# Altium footprint library Footprint.PcbLib: 411 footprints (part 7 of 26)
Each footprint in its own frame and in the unit in brackets; x right, y up, seen from the top. Pads: shape width x height; smd on the part's side, far side on the other; paste and mask are expansions set on the pad; w line width, h text height; cw(c..) or ccw(c..) is an arc to the next point about the centre after c.
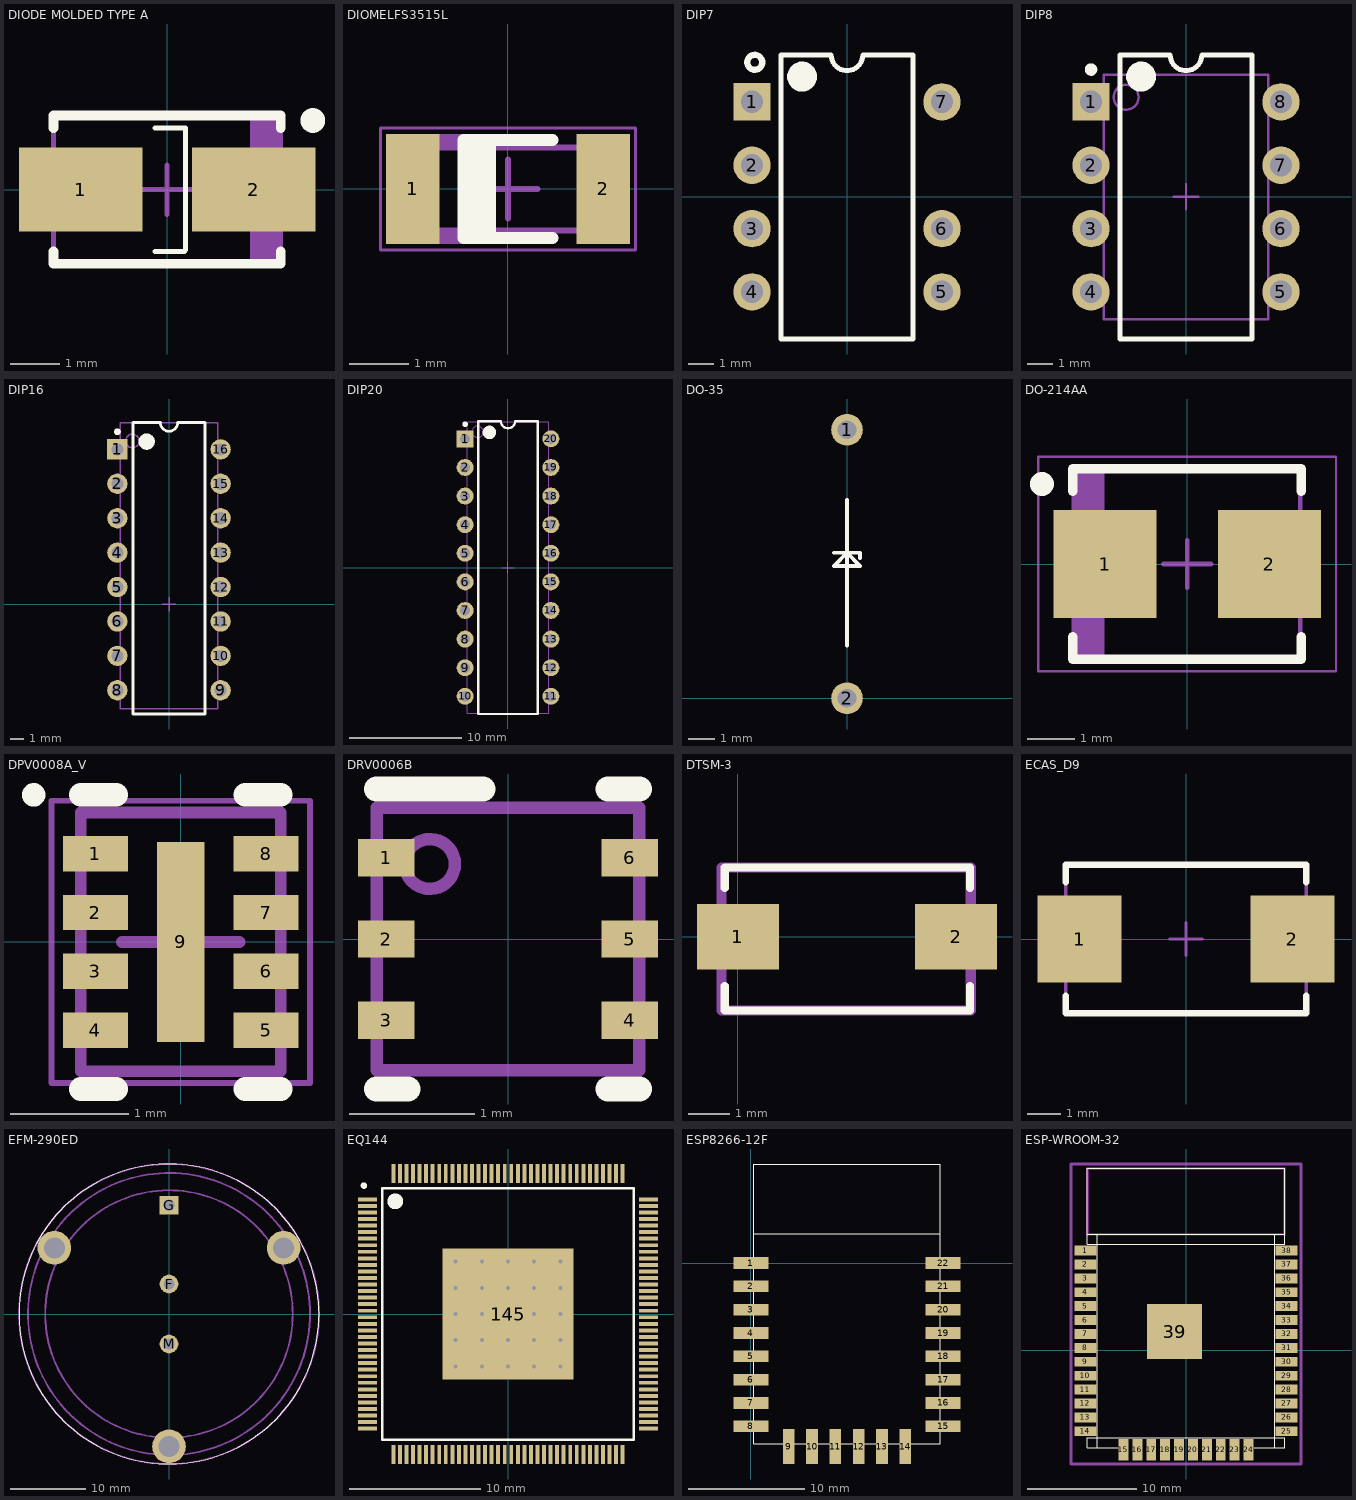
[diagram p6: the footprints below, top view; thin cyan lines are the x and y axes]

## DIODE MOLDED TYPE A [mm] "Molded Diode, 2-Leads, Body 4.30x2.60mm, IPC Medium Density"
height 2.3
pads (2):
  rect 2.5x1.7 smd: 1(-1.75,0) 2(1.75,0)
Top Overlay:
  circle w0.25: c2.95,1.4 r0.125
  lines w0.1: -0.25,-1.25 0.35,-1.25 ; -0.25,1.25 0.375,1.25 0.375,-1.225
  lines w0.2: -2.3,-1.25 -2.3,-1.5 2.3,-1.5 2.3,-1.25 ; -2.3,1.25 -2.3,1.5 2.3,1.5 2.3,1.25
Mechanical 15:
  rectangle: 1.681,-1.46 2.3,1.46
  lines w0.1: -0.5,0 0.5,0 ; 0,-0.5 0,0.5 ; -2.3,-1.46 -2.3,1.46 2.3,1.46 2.3,-1.46 -2.3,-1.46
  text ".Designator" at -2.7,1.9 h1.52
3D body "DIODE MOLDED TYPE A.step": height 2.3, standoff 0, extent -2.52,-1.46 2.52,1.46

## DIOMELFS3515L [mm] "MELF S Diode, 2-Leads, Body 3,50x1,50mm, IPC High Density"
height 1.4
pads (2):
  rect 0.9x1.85 smd: 1(-1.6,0) 2(1.6,0)
Top Overlay:
  rectangle: -0.75,-0.825 -0.2,0.825
  lines w0.2: 0.75,-0.825 -0.75,-0.825 -0.75,0.825 0.75,0.825
Mechanical 13:
  lines w0.1: -1.85,-0.7 1.85,-0.7 1.85,0.7 -1.85,0.7 -1.85,-0.7
Mechanical 15:
  rectangle: -1.75,-0.825 -1.2,0.825
  lines w0.05: -2.15,-1.025 2.15,-1.025 2.15,1.025 -2.15,1.025 -2.15,-1.025
  lines w0.1: -0.5,0 0.5,0 ; 0,-0.5 0,0.5
  lines w0.2: -0.25,-0.825 -1.75,-0.825 -1.75,0.825 -0.25,0.825
  text ".Designator" at -2.2,1.3 h1.52
3D body: height 1.39, standoff 0, extent 1.38,-0.7 1.85,0.697
3D body: height 1.38, standoff 0.04, extent -1.38,-0.67 1.38,0.667
3D body: height 1.38, standoff 0.04, extent -0.78,-0.671 -0.18,0.668
3D body: height 1.39, standoff 0, extent -1.85,-0.7 -1.38,0.697

## DIP7 [mm] "DIP, 7-Leads, Row Spacing 7.62mm, Pitch 2.54mm, Body 9.65x6.3mm"
height 4.5
pads (7):
  rect 1.5x1.5 hole 0.9: 1(-3.81,3.81)
  round 1.5 hole 0.9: 2(-3.81,1.27) 3(-3.81,-1.27) 4(-3.81,-3.81) 5(3.81,-3.81) 6(3.81,-1.27) 7(3.81,3.81)
Top Overlay:
  circle w0.6: c-1.8,4.825 r0.3
  circle w0.25: c-3.7,5.4 r0.3
  lines w0.15: -2.65,5.7 -2.65,5.7
  lines w0.2: -2.65,4.9 -2.65,-5.7 2.65,-5.7 2.65,5.7 1.435,5.7 0.635,5.7 cw(c0,5.7) -0.635,5.7 ; -2.65,4.925 -2.65,5.7 -0.634,5.7
3D body "CircuitWorks-DIP8.step": height 4.19, standoff -2.67, extent -3.937,-5.715 3.937,5.715

## DIP8 [mm] "DIP, 8-Leads, Row Spacing 7.62mm, Pitch 2.54mm, Body 9.65x6.3mm"
height 4.5
pads (8):
  rect 1.5x1.5 hole 0.9: 1(-3.81,3.81)
  round 1.5 hole 0.9: 2(-3.81,1.27) 3(-3.81,-1.27) 4(-3.81,-3.81) 5(3.81,-3.81) 6(3.81,-1.27) 7(3.81,1.27) 8(3.81,3.81)
Top Overlay:
  circle w0.6: c-1.8,4.825 r0.3
  circle w0.25: c-3.81,5.11 r0.125
  lines w0.15: -2.65,5.7 -2.65,5.7
  lines w0.2: -2.65,4.9 -2.65,-5.7 2.65,-5.7 2.65,5.7 1.435,5.7 0.635,5.7 cw(c0,5.7) -0.635,5.7 ; -2.65,4.925 -2.65,5.7 -0.634,5.7
Mechanical 13:
  circle w0.1: c-2.4,4 r0.5
  lines w0.1: -3.3,-4.9 3.3,-4.9 3.3,4.9 -3.3,4.9 -3.3,-4.9
Mechanical 15:
  lines w0.1: -0.5,0 0.5,0 ; 0,-0.5 0,0.5
3D body "CircuitWorks-DIP8.step": height 4.19, standoff -2.67, extent -3.937,-5.715 3.937,5.715

## DIP16 [mm] "DIP, 16-Pin, Row Spacing 7.62 mm, Pitch 2.54 mm"
height 4.57
pads (16):
  rect 1.5x1.5 hole 0.9: 1(-3.81,11.43)
  round 1.5 hole 0.9: 2(-3.81,8.89) 3(-3.81,6.35) 4(-3.81,3.81) 5(-3.81,1.27) 6(-3.81,-1.27) 7(-3.81,-3.81) 8(-3.81,-6.35) 9(3.81,-6.35) 10(3.81,-3.81) 11(3.81,-1.27) 12(3.81,1.27) 13(3.81,3.81) 14(3.81,6.35) 15(3.81,8.89) 16(3.81,11.43)
Top Overlay:
  circle w0.25: c-3.81,12.73 r0.125
  circle w0.6: c-1.65,12 r0.3
  lines w0.2: -2.65,-8.1 -2.65,13.405 -0.635,13.405 ccw(c0,13.405) 0.635,13.405 2.65,13.405 2.65,-8.1 -2.65,-8.1
Mechanical 13:
  circle w0.1: c-2.7,12.05 r0.5
  lines w0.1: -3.6,-7.7 -3.6,13.405 3.6,13.405 3.6,-7.7 -3.6,-7.7
Mechanical 15:
  lines w0.1: -0.5,0 0.5,0 ; 0,-0.5 0,0.5
3D body "CircuitWorks-DIP16.step": height 4.19, standoff -2.57, extent -3.937,-8.185 3.937,13.405

## DIP20 [mm] "DIP, 20-Pin, Row Spacing 7.62 mm, Pitch 2.54 mm"
height 4.57
pads (20):
  rect 1.5x1.5 hole 0.9: 1(-3.81,11.43)
  round 1.5 hole 0.9: 2(-3.81,8.89) 3(-3.81,6.35) 4(-3.81,3.81) 5(-3.81,1.27) 6(-3.81,-1.27) 7(-3.81,-3.81) 8(-3.81,-6.35) 9(-3.81,-8.89) 10(-3.81,-11.43) 11(3.81,-11.43) 12(3.81,-8.89) 13(3.81,-6.35) 14(3.81,-3.81) 15(3.81,-1.27) 16(3.81,1.27) 17(3.81,3.81) 18(3.81,6.35) 19(3.81,8.89) 20(3.81,11.43)
Top Overlay:
  circle w0.6: c-1.65,12 r0.3
  circle w0.25: c-3.81,12.73 r0.125
  lines w0.2: -2.65,-13 2.65,-13 2.65,13 0.635,13 cw(c0,13) -0.635,13 -2.65,13 -2.65,-13
Mechanical 13:
  circle w0.1: c-2.7,12.05 r0.5
  lines w0.1: -3.6,-12.95 3.6,-12.95 3.6,12.95 -3.6,12.95 -3.6,-12.95
Mechanical 15:
  lines w0.1: -0.5,0 0.5,0 ; 0,-0.5 0,0.5
3D body "User Library-DIP20.STEP": height 4.57, standoff -3.81, extent -3.91,-13.27 3.91,13.27

## DO-35 [mm] "Diode, glass"
pads (2):
  round 1.2 hole 0.7 unplated: 1(0,10.15) 2(0,0)
Top Overlay:
  lines w0.15: 0,2 0,4.9 0,5.5 ; 0,5.4 0,5.5 ; 0,7.5 0,5.5 ; 0.5,5.3 0.5,5.5 -0.5,5.5 0,5.5 ; 0,5.5 0.5,5 -0.5,5 0,5.5
3D body "User Library-do_35.step": height 2.15, standoff -2.54, extent -0.876,-0.266 0.876,10.427

## DO-214AA [mm] "Molded Diode, 2-Leads, Body 4,40x3,62mm, IPC Medium Density"
height 2.61
pads (2):
  rect 2.16x2.26 smd: 1(-1.725,0) 2(1.725,0)
Top Overlay:
  circle w0.25: c-3.05,1.68 r0.125
  lines w0.2: -2.4,-1.53 -2.4,-2 2.4,-2 2.4,-1.53 ; -2.4,1.53 -2.4,2 2.4,2 2.4,1.53
Assembly Top:
  rectangle: -2.375,-1.97 -1.736,1.97
  lines w0.1: -2.375,-1.97 -2.375,1.97 2.375,1.97 2.375,-1.97 -2.375,-1.97
Courtyard Top:
  lines w0.05: -3.125,-2.25 -3.125,2.25 3.125,2.25 3.125,-2.25 -3.125,-2.25
  lines w0.1: -0.5,0 0.5,0 ; 0,-0.5 0,0.5
3D body "DO-214AA.step": height 2.61, standoff 0, extent -2.595,-1.97 2.595,1.97

## DPV0008A_V [mm] "SON, 8-Leads, Body 1.6x2.1mm, Pitch 0.5mm, Thermal Pad 1.7x0.4mm"
height 0.65
pads (9):
  rect 0.55x0.3 smd paste-0.025 mask+0.07: 1(-0.725,0.75) 2(-0.725,0.25) 3(-0.725,-0.25) 4(-0.725,-0.75) 5(0.725,-0.75) 6(0.725,-0.25) 7(0.725,0.25) 8(0.725,0.75)
  rect 0.4x1.7 smd paste-0.2 mask+0.07: 9(0,0)
Top Overlay:
  circle w0.1: c-1.25,1.25 r0.05
  lines w0.2: -0.85,-1.25 -0.55,-1.25 ; -0.85,1.25 -0.55,1.25 ; 0.55,-1.25 0.85,-1.25 ; 0.55,1.25 0.85,1.25
Top Paste:
  rectangle: -0.15,-0.8 0.15,-0.4
  rectangle: -0.15,0.4 0.15,0.8
  rectangle: -0.15,-0.2 0.15,0.2
Mechanical 13:
  lines w0.1: -0.85,-1.1 -0.85,1.1 0.85,1.1 0.85,-1.1 -0.85,-1.1
Mechanical 15:
  lines w0.05: -1.1,-1.2 -1.1,1.2 1.1,1.2 1.1,-1.2 -1.1,-1.2
  lines w0.1: -0.5,0 0.5,0 ; 0,-0.5 0,0.5
3D body: height 0.65, standoff 0, extent -0.85,-1.1 0.85,1.1

## DRV0006B [mm]
pads (6):
  rect 0.45x0.3 smd paste+0 mask+0.051: 1(-0.975,0.65) 2(-0.975,0) 3(-0.975,-0.65) 4(0.975,-0.65) 5(0.975,0) 6(0.975,0.65)
Top Overlay:
  lines w0.2: -1.05,-1.2 -0.8,-1.2 ; -1.05,1.2 -0.2,1.2 ; 0.8,-1.2 1.05,-1.2 ; 0.8,1.2 1.05,1.2
Mechanical 13:
  circle w0.1: c-0.625,0.6 r0.2
  lines w0.1: -1.05,-1.05 1.05,-1.05 1.05,1.05 -1.05,1.05 -1.05,-1.05
3D body "DRV0006B.stp": height 0.8, standoff 0, extent -1,-1 1,1

## DTSM-3 [mm]
pads (2):
  rect 2x1.6 smd: 1(0,0) 2(5.338,0)
Top Overlay:
  lines w0.2: -0.32,-1.8 -0.32,-1.2 ; -0.32,1.2 -0.32,1.7 5.68,1.7 5.68,1.2 ; -0.3,-1.8 5.68,-1.8 5.68,-1.2
Mechanical 15:
  lines w0.254: -0.4,-1.8 5.7,-1.8 5.7,1.7 -0.4,1.7 -0.4,-1.8
  text ".Designator" at -0.2,2 h1.52

## ECAS_D9 [mm] "Molded Capacitor, 2-Leads, Body 7,15x4,30mm, IPC Low Density"
height 4.5
pads (2):
  rect 2.55x2.65 smd: 1(-3.225,0) 2(3.225,0)
Top Overlay:
  lines w0.2: -3.65,-1.725 -3.65,-2.25 3.65,-2.25 3.65,-1.725 ; -3.65,1.725 -3.65,2.25 3.65,2.25 3.65,1.725
Assembly Top:
  lines w0.1: -3.65,-2.25 3.65,-2.25 3.65,2.25 -3.65,2.25 -3.65,-2.25
Courtyard Top:
  lines w0.1: -0.5,0 0.5,0 ; 0,-0.5 0,0.5
3D body: height 4.5, standoff 0, extent -3.65,-2.25 3.65,2.25

## EFM-290ED [mm]
pads (7):
  round 2.5 hole 1.5: F(0,4) M(0,-4)
  rect 2.5x2.5 hole 1.5: G(0,14.5)
  round 3.8 hole 2.8: ""(-15.285,8.825)
  round 4.5 hole 2.8: ""(-15.285,8.825) ""(0,-17.65) ""(15.285,8.825)
Top Overlay:
  circle w0.15: c0,0 r20
Mechanical 15:
  circle w0.254: c0,0 r16.5
  circle w0.254: c0,0 r18.8
  circle w0.254: c0,0 r20
3D body: height 0, standoff -4, extent -0.496,14.001 0.5,14.999
3D body: height 4, standoff 0, extent -1.488,2.503 1.5,5.497
3D body: height 20, standoff 4, extent -20,-19.994 20,19.995
3D body: height 4.4, standoff -4.4, extent -16.426,7.677 -14.135,9.973
3D body: height 0, standoff -4, extent -0.447,3.491 0.549,4.489
3D body: height 0, standoff -4, extent -0.496,-4.499 0.5,-3.501
3D body: height 4, standoff 0, extent -1.488,13.003 1.5,15.997
3D body: height 4, standoff 0, extent -1.488,-5.497 1.5,-2.503
3D body: height 4.4, standoff -4.4, extent 14.145,7.677 16.435,9.973
3D body: height 4.4, standoff -4.4, extent -1.141,-18.798 1.15,-16.502

## EQ144 [mm] "TSQFP, 144-Leads, Body 20,00x20,00mm, Pitch 0,50mm, Thermal Pad 10,00x10,00mm, IPC Medium Density"
height 1.6
pads (145):
  rect 1.45x0.3 smd: 1(-10.725,8.75) 2(-10.725,8.25) 3(-10.725,7.75) 4(-10.725,7.25) 5(-10.725,6.75) 6(-10.725,6.25) 7(-10.725,5.75) 8(-10.725,5.25) 9(-10.725,4.75) 10(-10.725,4.25) 11(-10.725,3.75) 12(-10.725,3.25) 13(-10.725,2.75) 14(-10.725,2.25) 15(-10.725,1.75) 16(-10.725,1.25) 17(-10.725,0.75) 18(-10.725,0.25) 19(-10.725,-0.25) 20(-10.725,-0.75) 21(-10.725,-1.25) 22(-10.725,-1.75) 23(-10.725,-2.25) 24(-10.725,-2.75) 25(-10.725,-3.25) 26(-10.725,-3.75) 27(-10.725,-4.25) 28(-10.725,-4.75) 29(-10.725,-5.25) 30(-10.725,-5.75) 31(-10.725,-6.25) 32(-10.725,-6.75) 33(-10.725,-7.25) 34(-10.725,-7.75) 35(-10.725,-8.25) 36(-10.725,-8.75) 73(10.725,-8.75) 74(10.725,-8.25) 75(10.725,-7.75) 76(10.725,-7.25) 77(10.725,-6.75) 78(10.725,-6.25) 79(10.725,-5.75) 80(10.725,-5.25) 81(10.725,-4.75) 82(10.725,-4.25) 83(10.725,-3.75) 84(10.725,-3.25) 85(10.725,-2.75) 86(10.725,-2.25) 87(10.725,-1.75) 88(10.725,-1.25) 89(10.725,-0.75) 90(10.725,-0.25) 91(10.725,0.25) 92(10.725,0.75) 93(10.725,1.25) 94(10.725,1.75) 95(10.725,2.25) 96(10.725,2.75) 97(10.725,3.25) 98(10.725,3.75) 99(10.725,4.25) 100(10.725,4.75) 101(10.725,5.25) 102(10.725,5.75) 103(10.725,6.25) 104(10.725,6.75) 105(10.725,7.25) 106(10.725,7.75) 107(10.725,8.25) 108(10.725,8.75)
  rect 0.3x1.45 smd: 37(-8.75,-10.725) 38(-8.25,-10.725) 39(-7.75,-10.725) 40(-7.25,-10.725) 41(-6.75,-10.725) 42(-6.25,-10.725) 43(-5.75,-10.725) 44(-5.25,-10.725) 45(-4.75,-10.725) 46(-4.25,-10.725) 47(-3.75,-10.725) 48(-3.25,-10.725) 49(-2.75,-10.725) 50(-2.25,-10.725) 51(-1.75,-10.725) 52(-1.25,-10.725) 53(-0.75,-10.725) 54(-0.25,-10.725) 55(0.25,-10.725) 56(0.75,-10.725) 57(1.25,-10.725) 58(1.75,-10.725) 59(2.25,-10.725) 60(2.75,-10.725) 61(3.25,-10.725) 62(3.75,-10.725) 63(4.25,-10.725) 64(4.75,-10.725) 65(5.25,-10.725) 66(5.75,-10.725) 67(6.25,-10.725) 68(6.75,-10.725) 69(7.25,-10.725) 70(7.75,-10.725) 71(8.25,-10.725) 72(8.75,-10.725) 109(8.75,10.725) 110(8.25,10.725) 111(7.75,10.725) 112(7.25,10.725) 113(6.75,10.725) 114(6.25,10.725) 115(5.75,10.725) 116(5.25,10.725) 117(4.75,10.725) 118(4.25,10.725) 119(3.75,10.725) 120(3.25,10.725) 121(2.75,10.725) 122(2.25,10.725) 123(1.75,10.725) 124(1.25,10.725) 125(0.75,10.725) 126(0.25,10.725) 127(-0.25,10.725) 128(-0.75,10.725) 129(-1.25,10.725) 130(-1.75,10.725) 131(-2.25,10.725) 132(-2.75,10.725) 133(-3.25,10.725) 134(-3.75,10.725) 135(-4.25,10.725) 136(-4.75,10.725) 137(-5.25,10.725) 138(-5.75,10.725) 139(-6.25,10.725) 140(-6.75,10.725) 141(-7.25,10.725) 142(-7.75,10.725) 143(-8.25,10.725) 144(-8.75,10.725)
  rect 10x10 smd: 145(0,0)
via -4,4 diameter 0.7 hole 0.3
via -2,4 diameter 0.7 hole 0.3
via 0,4 diameter 0.7 hole 0.3
via 2,4 diameter 0.7 hole 0.3
via 4,4 diameter 0.7 hole 0.3
via -4,2 diameter 0.7 hole 0.3
via -2,2 diameter 0.7 hole 0.3
via 0,2 diameter 0.7 hole 0.3
via 2,2 diameter 0.7 hole 0.3
via 4,2 diameter 0.7 hole 0.3
via -4,0 diameter 0.7 hole 0.3
via -2,0 diameter 0.7 hole 0.3
via 0,0 diameter 0.7 hole 0.3
via 2,0 diameter 0.7 hole 0.3
via 4,0 diameter 0.7 hole 0.3
via -4,-2 diameter 0.7 hole 0.3
via -2,-2 diameter 0.7 hole 0.3
via 0,-2 diameter 0.7 hole 0.3
via 2,-2 diameter 0.7 hole 0.3
via 4,-2 diameter 0.7 hole 0.3
via -4,-4 diameter 0.7 hole 0.3
via -2,-4 diameter 0.7 hole 0.3
via 0,-4 diameter 0.7 hole 0.3
via 2,-4 diameter 0.7 hole 0.3
via 4,-4 diameter 0.7 hole 0.3
Top Overlay:
  circle w0.6: c-8.6,8.6 r0.3
  circle w0.25: c-11,9.8 r0.125
  lines w0.2: -9.6,-9.6 9.6,-9.6 9.6,9.6 -9.6,9.6 -9.6,-9.6
Courtyard Top:
  lines w0.1: -0.5,0 0.5,0 ; 0,-0.5 0,0.5
3D body: height 1.6, standoff 0.05, extent -10,-10 10,10

## ESP8266-12F [mm]
pads (22):
  rect 3x1 smd: 1(0.012,0) 2(0.012,-2) 3(0.012,-4) 4(0.012,-6) 5(0.012,-8) 6(0.012,-10) 7(0.012,-12) 8(0.012,-14) 15(16.488,-14) 16(16.488,-12) 17(16.488,-10) 18(16.488,-8) 19(16.488,-6) 20(16.488,-4) 21(16.488,-2) 22(16.488,0)
  rect 1x3 smd: 9(3.25,-15.738) 10(5.25,-15.738) 11(7.25,-15.738) 12(9.25,-15.738) 13(11.25,-15.738) 14(13.25,-15.738)
Top Overlay:
  lines w0.1: 0.25,2.5 16.25,2.5 ; 0.25,-15.5 16.25,-15.5 16.25,8.5 0.25,8.5 0.25,-15.5

## ESP-WROOM-32 [mm]
pads (39):
  rect 2x0.9 smd: 1(-9.188,9.096) 2(-9.188,7.826) 3(-9.188,6.556) 4(-9.188,5.286) 5(-9.188,4.016) 6(-9.188,2.746) 7(-9.188,1.476) 8(-9.188,0.206) 9(-9.188,-1.064) 10(-9.188,-2.334) 11(-9.188,-3.604) 12(-9.188,-4.874) 13(-9.188,-6.144) 14(-9.188,-7.414) 25(9.188,-7.414) 26(9.188,-6.144) 27(9.188,-4.874) 28(9.188,-3.604) 29(9.188,-2.334) 30(9.188,-1.064) 31(9.188,0.206) 32(9.188,1.476) 33(9.188,2.746) 34(9.188,4.016) 35(9.188,5.286) 36(9.188,6.556) 37(9.188,7.826) 38(9.188,9.096)
  rect 0.9x2 smd: 15(-5.715,-9.096) 16(-4.445,-9.096) 17(-3.175,-9.096) 18(-1.905,-9.096) 19(-0.635,-9.096) 20(0.635,-9.096) 21(1.905,-9.096) 22(3.175,-9.096) 23(4.445,-9.096) 24(5.715,-9.096)
  rect 5x5 smd: 39(-1.05,1.692)
Top Overlay:
  lines w0.1: -8.1,-8.909 -8.1,-8.009 ; -8.1,10.592 -8.1,9.691 ; -6.25,-8.909 -9,-8.909 -9,-8.009 -8.1,-8.009 ; 6.25,-8.909 9,-8.909 9,-8.009 8.1,-8.009 ; 8.1,-8.909 8.1,-8.009 ; 8.1,10.592 8.1,9.691 ; -9,10.592 9,10.592 ; -9,10.592 -9,16.591 9,16.591 9,10.592 ; -9,10.592 -9,9.691 -8.1,9.691 ; -8.1,-8.009 8.1,-8.009 ; -8.1,-8.009 -8.1,9.691 ; -8.1,9.691 8.1,9.691 ; 8.1,-8.009 8.1,9.691 ; 8.1,9.691 9,9.691 9,10.592
Keep-Out Layer:
  lines w0.254: -9,10.592 9,10.592 9,16.591 -9,16.591 -9,10.592
Mechanical 15:
  lines w0.254: -10.5,-10.4 10.5,-10.4 10.5,17 -10.5,17 -10.5,-10.4
  text ".Designator" at -10.1,17.3 h1.52
3D body "User Library-esp-wroom-32.STEP": height 3, standoff -0.04, extent -9.073,-8.943 8.997,16.597